# Altium footprint library 1.10-电容.PcbLib: 193 footprints (part 8 of 13)
Each footprint in its own frame and in the unit in brackets; x right, y up, seen from the top. Pads: shape width x height; smd on the part's side, far side on the other; paste and mask are expansions set on the pad; w line width, h text height; cw(c..) or ccw(c..) is an arc to the next point about the centre after c.
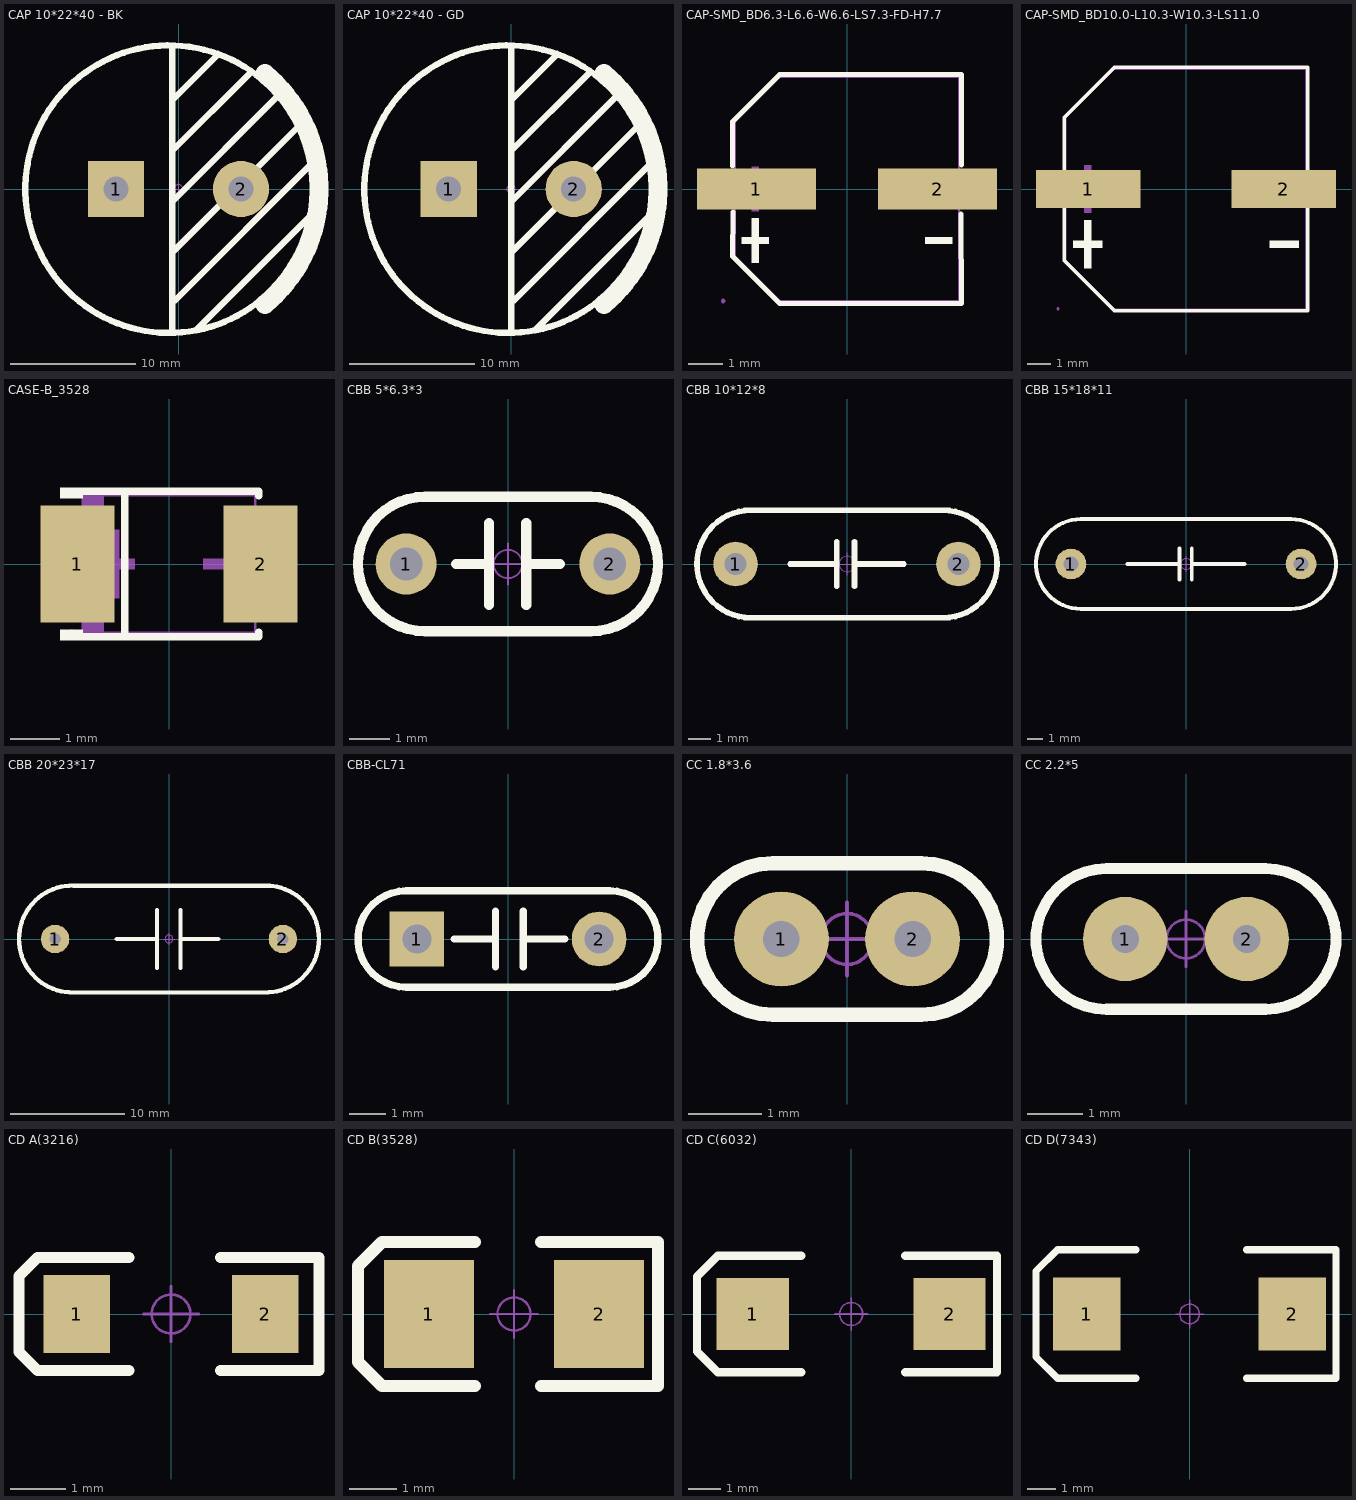
[diagram p7: the footprints below, top view; thin cyan lines are the x and y axes]

## CAP 10*22*40 - BK [mm] "脚距10mm直径22mm高度40mm      淘宝ID:黄晶宝石"
pads (2):
  rect 4.5x4.5 hole 2: 1(-5,0)
  round 4.5 hole 2: 2(5,0)
Top Overlay:
  circle w0.508: c-0.756,-0.013 r11.5
  lines w0.508: -0.508,-11.25 -0.508,11.25 ; -0.508,-5.08 9.525,4.953 ; -0.508,-1.016 7.874,7.366 ; -0.508,3.048 5.715,9.271 ; -0.508,7.112 3.048,10.668 ; -0.254,-8.89 10.922,2.286 ; 1.46,-11.239 10.541,-2.159
  lines w1.524: 6.92,-9.219 ccw(c-0.762,0) 6.92,9.219
Mechanical 15:
  circle w0.05: c0,0 r0.35
  lines w0.05: -0.5,0 0.5,0 ; 0,-0.5 0,0.5
3D body "CAP 10X22X40.STEP": height 40.04, standoff -3.37, extent -11,-10.999 11.01,10.999

## CAP 10*22*40 - GD [mm] "脚距10mm直径22mm高度40mm      淘宝ID:黄晶宝石"
pads (2):
  rect 4.5x4.5 hole 2: 1(-5,0)
  round 4.5 hole 2: 2(5,0)
Top Overlay:
  circle w0.508: c-0.248,-0.013 r11.5
  lines w0.508: 0,-11.25 0,11.25 ; 0,-5.08 10.033,4.953 ; 0,-1.016 8.382,7.366 ; 0,3.048 6.223,9.271 ; 0,7.112 3.556,10.668 ; 0.254,-8.89 11.43,2.286 ; 1.968,-11.239 11.049,-2.159
  lines w1.524: 7.428,-9.219 ccw(c-0.254,0) 7.428,9.219
Mechanical 15:
  circle w0.05: c0,0 r0.35
  lines w0.05: -0.5,0 0.5,0 ; 0,-0.5 0,0.5
3D body "CAP 10X22X40.STEP": height 40.04, standoff -3.37, extent -11,-10.999 11.01,10.999

## CAP-SMD_BD6.3-L6.6-W6.6-LS7.3-FD-H7.7 [mm]
pads (2):
  rect 3.5x1.2 smd: 1(-2.67,0) 2(2.67,0)
Top Overlay:
  region: 3.102,-1.419 3.102,-1.617 2.31,-1.617 2.31,-1.419
  region: -3.102,-1.419 -3.102,-1.617 -2.31,-1.617 -2.31,-1.419
  region: -2.805,-0.858 -2.805,-2.178 -2.607,-2.178 -2.607,-0.858
  lines w0.152: -3.376,0.686 -3.376,1.98 -1.98,3.376 3.376,3.376 3.369,0.708 ; -3.362,-0.686 -3.376,-1.981 -1.981,-3.376 3.376,-3.376 3.356,-0.739
Mechanical 6:
  region: 3.102,0.099 3.102,-0.099 2.31,-0.099 2.31,0.099
  region: -3.102,0.099 -3.102,-0.099 -2.31,-0.099 -2.31,0.099
  region: -2.805,0.66 -2.805,-0.66 -2.607,-0.66 -2.607,0.66
Mechanical 15:
  region: -3.592,-3.3 -3.592,-3.325 -3.627,-3.36 -3.676,-3.36 -3.711,-3.325 -3.711,-3.3 -3.711,-3.275 -3.676,-3.24 -3.627,-3.24 -3.592,-3.275 -3.592,-3.3
  region: -3.652,0.35 -1.002,0.35 -1.002,-0.35 -3.652,-0.35
  region: 0.999,0.35 3.649,0.35 3.649,-0.35 0.999,-0.35
  lines w0.051: -3.3,-1.98 -1.98,-3.3 3.3,-3.3 3.3,3.3 -1.98,3.3 -3.3,1.98 -3.3,-1.98
3D body "CT 6X6-V.STEP": height 6, standoff -0.01, extent -3.398,-3.051 3.602,3.249

## CAP-SMD_BD10.0-L10.3-W10.3-LS11.0 [mm]
pads (2):
  rect 4.5x1.65 smd: 1(-4.2,0) 2(4.2,0)
Top Overlay:
  region: 4.841,-2.214 4.841,-2.523 3.605,-2.523 3.605,-2.214
  region: -4.841,-2.214 -4.841,-2.523 -3.605,-2.523 -3.605,-2.214
  region: -4.378,-1.339 -4.378,-3.399 -4.068,-3.399 -4.068,-1.339
  lines w0.152: -5.226,-0.852 -5.226,-3.09 -3.09,-5.226 5.226,-5.226 5.226,-0.852 ; -5.226,0.852 -5.226,3.09 -3.09,5.226 5.226,5.226 5.226,0.852
Mechanical 6:
  region: 4.841,0.155 4.841,-0.155 3.605,-0.155 3.605,0.155
  region: -4.841,0.155 -4.841,-0.155 -3.605,-0.155 -3.605,0.155
  region: -4.378,1.03 -4.378,-1.03 -4.068,-1.03 -4.068,1.03
Mechanical 15:
  region: -5.503,0.45 -2.003,0.45 -2.003,-0.45 -5.503,-0.45
  region: 2.003,0.45 5.503,0.45 5.503,-0.45 2.003,-0.45
  region: -5.443,-5.15 -5.443,-5.175 -5.478,-5.21 -5.528,-5.21 -5.563,-5.175 -5.563,-5.15 -5.563,-5.125 -5.528,-5.09 -5.478,-5.09 -5.443,-5.125 -5.443,-5.15
  lines w0.051: -5.15,-3.09 -5.15,3.09 -3.09,5.15 5.15,5.15 5.15,-5.15 -3.09,-5.15 -5.15,-3.09
3D body "C1~CAP-SMD_BD10.0-L10.3-W10.3-LS11.0~CAP-SMD_BD10.0-L10.3-W10.3-LS11.0~gBgT.STEP": height 10.05, standoff 0, extent -5.373,-5.15 5.627,5.151

## CASE-B_3528 [mm]
pads (2):
  rect 1.506x2.376 smd: 1(-1.861,0) 2(1.861,0)
Top Overlay:
  region: -1.75,-1.552 -1.75,-1.34 -2.207,-1.34 -2.207,-1.552
  region: -1.75,1.552 -1.75,1.34 -2.207,1.34 -2.207,1.552
  lines w0.152: -1.826,-1.476 1.826,-1.476 1.826,-1.391 ; -1.826,1.476 1.826,1.476 1.826,1.391 ; -0.904,-1.476 -0.904,1.476
Mechanical 6:
  region: 1.54,0.105 1.54,-0.105 0.7,-0.105 0.7,0.105
  region: -1.54,0.105 -1.54,-0.105 -0.7,-0.105 -0.7,0.105
  region: -1.225,0.7 -1.225,-0.7 -1.015,-0.7 -1.015,0.7
  region: -1.75,1.4 -1.75,0.7 -1.33,0.7 -1.33,1.4
  region: -1.75,-1.4 -1.75,-0.7 -1.33,-0.7 -1.33,-1.4
Mechanical 15:
  region: -1.92,-1.4 -1.92,-1.425 -1.955,-1.46 -2.005,-1.46 -2.04,-1.425 -2.04,-1.4 -2.04,-1.375 -2.005,-1.34 -1.955,-1.34 -1.92,-1.375 -1.92,-1.4
  region: 1.98,1.1 1.98,-1.1 1.28,-1.1 1.28,1.1
  region: -1.98,1.1 -1.98,-1.1 -1.28,-1.1 -1.28,1.1
  lines w0.051: -1.75,-1.4 1.75,-1.4 1.75,1.4 -1.75,1.4 -1.75,-1.4
3D body "C4~CASE-B_3528~CASE-B_L3.5-W2.8-H1.9~nynK.STEP": height 2, standoff 0, extent -1.977,-1.273 1.723,1.527

## CBB 5*6.3*3 [mm] "脚距5mm高6.3mm厚3mm      淘宝ID:黄晶宝石"
pads (2):
  round 1.5 hole 0.8: 1(-2.5,0) 2(2.5,0)
Top Overlay:
  lines w0.254: -1.27,0 -0.555,0 ; -0.466,-1 -0.466,1 ; 0.445,-1 0.445,1 ; 0.461,0 1.27,0 ; -2.032,-1.651 cw(c-2.032,0) -2.032,1.651 2.032,1.651 cw(c2.032,0) 2.032,-1.651 -2.032,-1.651
Mechanical 15:
  circle w0.05: c0,0 r0.35
  lines w0.05: -0.5,0 0.5,0 ; 0,-0.5 0,0.5
3D body "CBB 6.3X6.3X5.STEP": height 6.8, standoff -3.5, extent -3.15,-1.5 3.15,1.5

## CBB 10*12*8 [mm] "脚距10mm高12mm厚8mm      淘宝ID:黄晶宝石"
pads (2):
  round 2 hole 1: 1(-5,0) 2(5,0)
Top Overlay:
  lines w0.254: -2.54,0 -0.555,0 ; -0.466,-1 -0.466,1 ; 0.334,-1 0.334,1 ; 0.461,0 2.54,0 ; -4.318,-2.413 cw(c-4.318,0) -4.318,2.413 4.318,2.413 cw(c4.318,0) 4.318,-2.413 -4.318,-2.413
Mechanical 15:
  circle w0.05: c0,0 r0.35
  lines w0.05: -0.5,0 0.5,0 ; 0,-0.5 0,0.5
3D body "CBB 10X12X8.STEP": height 8.53, standoff -3.47, extent -6,-2.25 6,2.25

## CBB 15*18*11 [mm] "脚距15mm高18mm厚11mm      淘宝ID:黄晶宝石"
pads (2):
  round 2 hole 1: 1(-7.5,0) 2(7.5,0)
Top Overlay:
  lines w0.254: -6.858,-2.921 6.858,-2.921 ccw(c6.858,0) 6.857,2.921 -6.858,2.921 ccw(c-6.858,0) -6.857,-2.921 ; -3.81,0 -0.515,0 ; -0.426,-1 -0.426,1 ; 0.374,-1 0.374,1 ; 0.501,0 3.81,0
Mechanical 15:
  circle w0.05: c0,0 r0.35
  lines w0.05: -0.5,0 0.5,0 ; 0,-0.5 0,0.5
3D body "CBB 15X18X11.STEP": height 11.53, standoff -3.47, extent -9,-2.75 9,2.75

## CBB 20*23*17 [mm] "脚距20mm高23mm厚17mm      淘宝ID:黄晶宝石"
pads (2):
  round 2.5 hole 1: 1(-10,0) 2(10,0)
Top Overlay:
  lines w0.381: -8.382,4.682 8.89,4.682 ; -8.382,4.691 ccw(c-8.476,0) -8.382,-4.691 8.382,-4.691 ccw(c8.476,0) 8.382,4.691 ; -4.572,0 -1.277,0 ; -1.054,-2.54 -1.054,2.54 ; 1.016,-2.54 1.016,2.54 ; 1.016,0 4.318,0
Mechanical 15:
  circle w0.05: c0,0 r0.35
  lines w0.05: -0.5,0 0.5,0 ; 0,-0.5 0,0.5
3D body "CBB 20X23X17.STEP": height 17.53, standoff -3.47, extent -11.5,-4.5 11.5,4.5

## CBB-CL71 [mm] "7.2mm*2.3mm*6.5mm(长*宽*高）      淘宝ID:黄晶宝石"
pads (2):
  rect 1.5x1.5 hole 0.8: 1(-2.5,0)
  round 1.5 hole 0.8: 2(2.5,0)
Top Overlay:
  lines w0.2: -1.484,0 -0.341,0 ; -0.341,-0.762 -0.341,0.762 ; 0.421,-0.762 0.421,0.762 ; 0.421,0 1.564,0 ; -2.794,-1.321 cw(c-2.794,0) -2.794,1.321 2.794,1.321 cw(c2.794,0) 2.794,-1.321 -2.794,-1.321
3D body "CL71.STEP": height 6.55, standoff -3.45, extent -3.6,-1.15 3.6,1.15

## CC 1.8*3.6 [mm] "脚距1.8mm直径3.6mm      淘宝ID:黄晶宝石"
pads (2):
  round 1.3 hole 0.5: 1(-0.9,0) 2(0.9,0)
Top Overlay:
  lines w0.2: -1.016,-1.041 cw(c-1.016,0) -1.016,1.041 1.016,1.041 cw(c1.016,0) 1.016,-1.041 -1.016,-1.041
Mechanical 15:
  circle w0.05: c0,0 r0.35
  lines w0.05: -0.5,0 0.5,0 ; 0,-0.5 0,0.5
3D body "CC 1.8X3.6.STEP": height 3.6, standoff -3.5, extent -1.8,-0.798 1.8,0.796

## CC 2.2*5 [mm] "脚距2.2mm直径5mm      淘宝ID:黄晶宝石"
height 6.35
pads (2):
  round 1.524 hole 0.5: 1(-1.1,0) 2(1.1,0)
Top Overlay:
  lines w0.2: -1.44,-1.271 cw(c-1.44,0) -1.44,1.271 1.44,1.271 cw(c1.44,0) 1.44,-1.271 -1.44,-1.269
Mechanical 15:
  circle w0.05: c0,0 r0.35
  lines w0.05: -0.5,0 0.5,0 ; 0,-0.5 0,0.5
3D body "CC 2.2X5.STEP": height 4.8, standoff -3.5, extent -2.4,-0.917 2.4,0.918

## CD A(3216) [mm] "长3.2mm，宽1.6mm，厚1.6mm      淘宝ID:黄晶宝石"
pads (2):
  rect 1.2x1.4 smd: 1(-1.7,0) 2(1.7,0)
Top Overlay:
  lines w0.2: -0.762,-1.016 -2.413,-1.016 -2.743,-0.686 -2.743,0.686 -2.413,1.016 -0.762,1.016 ; 0.889,-1.016 2.667,-1.016 2.667,1.016 0.889,1.016
Mechanical 15:
  circle w0.05: c0,0 r0.35
  lines w0.05: -0.5,0 0.5,0 ; 0,-0.5 0,0.5
3D body "CD A(3216).STEP": height 1.6, standoff -0.01, extent -1.6,-0.8 1.6,0.8

## CD B(3528) [mil] "长3.5mm，宽2.8mm，厚1.9mm      淘宝ID:黄晶宝石"
pads (2):
  rect 75x90 smd: 1(-70.87,-0.01) 2(70.86,-0.01)
Top Overlay:
  lines w10: -32.51,-60 -110,-60 -130,-40 -130,40 -110,60 -32.51,60 ; 22.49,-60 120,-60 120,60 22.49,60
Mechanical 15:
  circle w1.97: c0,0 r13.78
  lines w1.97: -19.68,0 19.68,0 ; 0,-19.68 0,19.68
3D body "CD B(3528).STEP": height 74.84, standoff -0.3, extent -68.92,-55.12 68.91,55.11

## CD C(6032) [mm] "长6.0mm，宽3.2mm，厚2.5mm      淘宝ID:黄晶宝石"
pads (2):
  rect 2.2x2.2 smd: 1(-3,0) 2(3,0)
Top Overlay:
  lines w0.254: -1.524,-1.778 -4.064,-1.778 -4.699,-1.143 -4.699,1.143 -4.064,1.778 -1.524,1.778 ; 1.651,-1.778 4.445,-1.778 4.445,1.778 1.651,1.778
Mechanical 15:
  circle w0.05: c0,0 r0.35
  lines w0.05: -0.5,0 0.5,0 ; 0,-0.5 0,0.5
3D body "CD C(6032).STEP": height 2.5, standoff -0.01, extent -3,-1.6 3,1.6

## CD D(7343) [mm] "长7.3mm，宽4.3mm，厚2.8mm      淘宝ID:黄晶宝石"
pads (2):
  rect 2.4x2.6 smd: 1(-3.65,0) 2(3.65,0)
Top Overlay:
  lines w0.254: -1.905,-2.286 -4.699,-2.286 -5.461,-1.524 -5.461,1.524 -4.699,2.286 -1.905,2.286 ; 2.032,-2.286 5.207,-2.286 5.207,2.286 2.032,2.286
Mechanical 15:
  circle w0.05: c0,0 r0.35
  lines w0.05: -0.5,0 0.5,0 ; 0,-0.5 0,0.5
3D body "CD D(7343H).STEP": height 2.8, standoff -0.01, extent -3.65,-2.15 3.65,2.15